# Altium schematic symbol library ADC_Driver.SchLib: 6 symbols
Pins are listed as number, name and electrical type; pins without a type are passive.

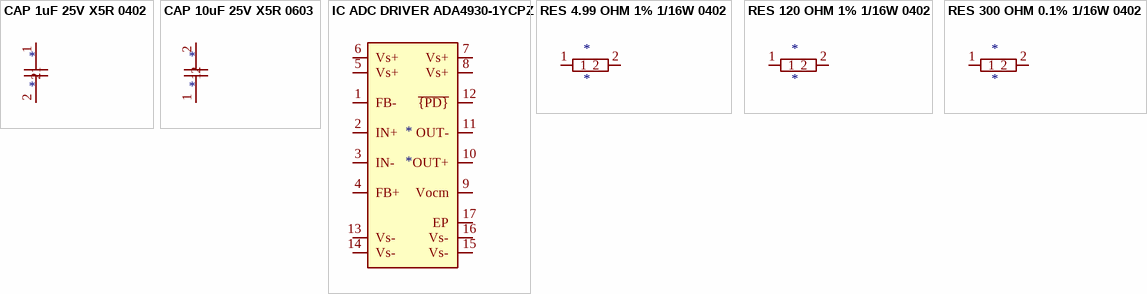
[diagram p0: symbols CAP 1uF 25V X5R 0402 to RES 300 OHM 0.1% 1/16W 0402]

## CAP 1uF 25V X5R 0402
designator *
pins: 1, 2

## CAP 10uF 25V X5R 0603
designator *
pins: 1, 2

## IC ADC DRIVER ADA4930-1YCPZ
designator *
pins: 1 FB-, 2 IN+, 3 IN-, 4 FB+, 5 Vs+, 6 Vs+, 7 Vs+, 8 Vs+, 9 Vocm, 10 OUT+, 11 OUT-, 12 ~{{PD}}, 13 Vs-, 14 Vs-, 15 Vs-, 16 Vs-, 17 EP

## RES 4.99 OHM 1% 1/16W 0402
designator *
pins: 1, 2

## RES 120 OHM 1% 1/16W 0402
designator *
pins: 1, 2

## RES 300 OHM 0.1% 1/16W 0402
designator *
pins: 1, 2